# EAGLE library part CON_BEAGLEBONE (library dp_devices.v6)
Beagle Bone Cape
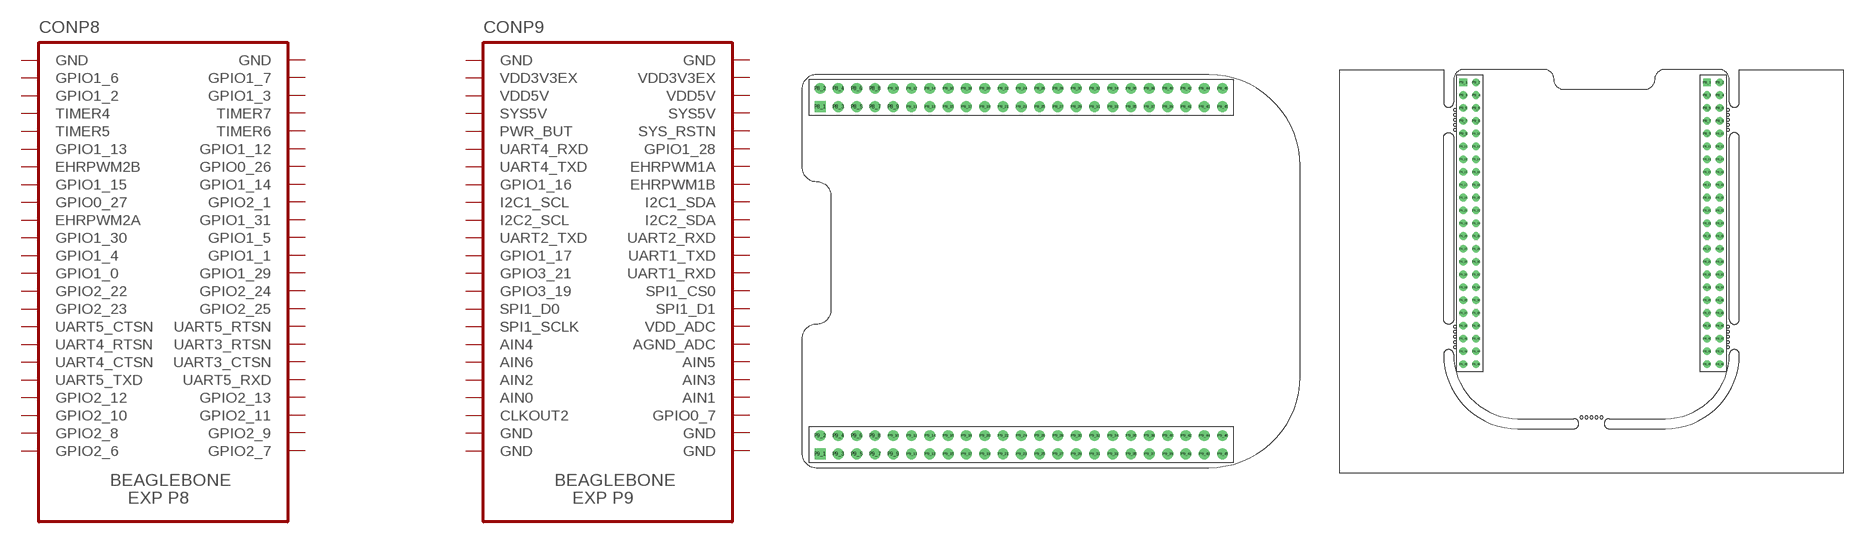
[diagram p147: symbol with the pads of CON_BEAGLEBONE; footprints CON_BEAGLEBONE, CON_BEAGLEBONE_NB]

Designator prefix CON; gates P8=BEAGLEBONE_P8 P9=BEAGLEBONE_P9

## CON_BEAGLEBONE  [CON_BEAGLEBONE]
P8_1  P8:GND  sup
P8_2  P8:GND  sup
P8_3  P8:GPIO1_6
P8_4  P8:GPIO1_7
P8_5  P8:GPIO1_2
P8_6  P8:GPIO1_3
P8_7  P8:TIMER4
P8_8  P8:TIMER7
P8_9  P8:TIMER5
P8_10  P8:TIMER6
P8_11  P8:GPIO1_13
P8_12  P8:GPIO1_12
P8_13  P8:EHRPWM2B
P8_14  P8:GPIO0_26
P8_15  P8:GPIO1_15
P8_16  P8:GPIO1_14
P8_17  P8:GPIO0_27
P8_18  P8:GPIO2_1
P8_19  P8:EHRPWM2A
P8_20  P8:GPIO1_31
P8_21  P8:GPIO1_30
P8_22  P8:GPIO1_5
P8_23  P8:GPIO1_4
P8_24  P8:GPIO1_1
P8_25  P8:GPIO1_0
P8_26  P8:GPIO1_29
P8_27  P8:GPIO2_22
P8_28  P8:GPIO2_24
P8_29  P8:GPIO2_23
P8_30  P8:GPIO2_25
P8_31  P8:UART5_CTSN
P8_32  P8:UART5_RTSN
P8_33  P8:UART4_RTSN
P8_34  P8:UART3_RTSN
P8_35  P8:UART4_CTSN
P8_36  P8:UART3_CTSN
P8_37  P8:UART5_TXD
P8_38  P8:UART5_RXD
P8_39  P8:GPIO2_12
P8_40  P8:GPIO2_13
P8_41  P8:GPIO2_10
P8_42  P8:GPIO2_11
P8_43  P8:GPIO2_8
P8_44  P8:GPIO2_9
P8_45  P8:GPIO2_6
P8_46  P8:GPIO2_7
P9_1  P9:GND  sup
P9_2  P9:GND  sup
P9_3  P9:VDD3V3EX  sup
P9_4  P9:VDD3V3EX  sup
P9_5  P9:VDD5V  sup
P9_6  P9:VDD5V  sup
P9_7  P9:SYS5V  sup
P9_8  P9:SYS5V  sup
P9_9  P9:PWR_BUT
P9_10  P9:SYS_RSTN
P9_11  P9:UART4_RXD
P9_12  P9:GPIO1_28
P9_13  P9:UART4_TXD
P9_14  P9:EHRPWM1A
P9_15  P9:GPIO1_16
P9_16  P9:EHRPWM1B
P9_17  P9:I2C1_SCL
P9_18  P9:I2C1_SDA
P9_19  P9:I2C2_SCL
P9_20  P9:I2C2_SDA
P9_21  P9:UART2_TXD
P9_22  P9:UART2_RXD
P9_23  P9:GPIO1_17
P9_24  P9:UART1_TXD
P9_25  P9:GPIO3_21
P9_26  P9:UART1_RXD
P9_27  P9:GPIO3_19
P9_28  P9:SPI1_CS0
P9_29  P9:SPI1_D0
P9_30  P9:SPI1_D1
P9_31  P9:SPI1_SCLK
P9_32  P9:VDD_ADC
P9_33  P9:AIN4
P9_34  P9:AGND_ADC
P9_35  P9:AIN6
P9_36  P9:AIN5
P9_37  P9:AIN2
P9_38  P9:AIN3
P9_39  P9:AIN0
P9_40  P9:AIN1
P9_41  P9:CLKOUT2
P9_42  P9:GPIO0_7
P9_43  P9:GND
P9_44  P9:GND
P9_45  P9:GND
P9_46  P9:GND

## CON_BEAGLEBONE-NB  [CON_BEAGLEBONE_NB]
Pads as for CON_BEAGLEBONE

## Footprint CON_BEAGLEBONE (pad centres in mm)
Derived from Beaglebone rev c2 http://elinux.org/Beagleboard:BeagleBone#Rev_A6A
drill 1 square: P8_1 2.54,50.165; P9_1 2.54,1.905
drill 1: P8_2 2.54,52.705; P8_3 5.08,50.165; P8_4 5.08,52.705; P8_5 7.62,50.165; P8_6 7.62,52.705; P8_7 10.16,50.165; P8_8 10.16,52.705; P8_9 12.7,50.165; P8_10 12.7,52.705; P8_11 15.24,50.165; P8_12 15.24,52.705; P8_13 17.78,50.165; P8_14 17.78,52.705; P8_15 20.32,50.165; P8_16 20.32,52.705; P8_17 22.86,50.165; P8_18 22.86,52.705; P8_19 25.4,50.165; P8_20 25.4,52.705; P8_21 27.94,50.165; P8_22 27.94,52.705; P8_23 30.48,50.165; P8_24 30.48,52.705; P8_25 33.02,50.165; P8_26 33.02,52.705; P8_27 35.56,50.165; P8_28 35.56,52.705; P8_29 38.1,50.165; P8_30 38.1,52.705; P8_31 40.64,50.165; P8_32 40.64,52.705; P8_33 43.18,50.165; P8_34 43.18,52.705; P8_35 45.72,50.165; P8_36 45.72,52.705; P8_37 48.26,50.165; P8_38 48.26,52.705; P8_39 50.8,50.165; P8_40 50.8,52.705; P8_41 53.34,50.165; P8_42 53.34,52.705; P8_43 55.88,50.165; P8_44 55.88,52.705; P8_45 58.42,50.165; P8_46 58.42,52.705; P9_2 2.54,4.445; P9_3 5.08,1.905; P9_4 5.08,4.445; P9_5 7.62,1.905; P9_6 7.62,4.445; P9_7 10.16,1.905; P9_8 10.16,4.445; P9_9 12.7,1.905; P9_10 12.7,4.445; P9_11 15.24,1.905; P9_12 15.24,4.445; P9_13 17.78,1.905; P9_14 17.78,4.445; P9_15 20.32,1.905; P9_16 20.32,4.445; P9_17 22.86,1.905; P9_18 22.86,4.445; P9_19 25.4,1.905; P9_20 25.4,4.445; P9_21 27.94,1.905; P9_22 27.94,4.445; P9_23 30.48,1.905; P9_24 30.48,4.445; P9_25 33.02,1.905; P9_26 33.02,4.445; P9_27 35.56,1.905; P9_28 35.56,4.445; P9_29 38.1,1.905; P9_30 38.1,4.445; P9_31 40.64,1.905; P9_32 40.64,4.445; P9_33 43.18,1.905; P9_34 43.18,4.445; P9_35 45.72,1.905; P9_36 45.72,4.445; P9_37 48.26,1.905; P9_38 48.26,4.445; P9_39 50.8,1.905; P9_40 50.8,4.445; P9_41 53.34,1.905; P9_42 53.34,4.445; P9_43 55.88,1.905; P9_44 55.88,4.445; P9_45 58.42,1.905; P9_46 58.42,4.445

## Footprint CON_BEAGLEBONE_NB (pad centres in mm)
Derived from Beaglebone rev c2 http://elinux.org/Beagleboard:BeagleBone#Rev_A6A Break-offs with eagle limitation 100x80 mm
drill 1 square: P8_1 72.86,77.46; P9_1 24.6,77.46
drill 1: P8_2 75.4,77.46; P8_3 72.86,74.92; P8_4 75.4,74.92; P8_5 72.86,72.38; P8_6 75.4,72.38; P8_7 72.86,69.84; P8_8 75.4,69.84; P8_9 72.86,67.3; P8_10 75.4,67.3; P8_11 72.86,64.76; P8_12 75.4,64.76; P8_13 72.86,62.22; P8_14 75.4,62.22; P8_15 72.86,59.68; P8_16 75.4,59.68; P8_17 72.86,57.14; P8_18 75.4,57.14; P8_19 72.86,54.6; P8_20 75.4,54.6; P8_21 72.86,52.06; P8_22 75.4,52.06; P8_23 72.86,49.52; P8_24 75.4,49.52; P8_25 72.86,46.98; P8_26 75.4,46.98; P8_27 72.86,44.44; P8_28 75.4,44.44; P8_29 72.86,41.9; P8_30 75.4,41.9; P8_31 72.86,39.36; P8_32 75.4,39.36; P8_33 72.86,36.82; P8_34 75.4,36.82; P8_35 72.86,34.28; P8_36 75.4,34.28; P8_37 72.86,31.74; P8_38 75.4,31.74; P8_39 72.86,29.2; P8_40 75.4,29.2; P8_41 72.86,26.66; P8_42 75.4,26.66; P8_43 72.86,24.12; P8_44 75.4,24.12; P8_45 72.86,21.58; P8_46 75.4,21.58; P9_2 27.14,77.46; P9_3 24.6,74.92; P9_4 27.14,74.92; P9_5 24.6,72.38; P9_6 27.14,72.38; P9_7 24.6,69.84; P9_8 27.14,69.84; P9_9 24.6,67.3; P9_10 27.14,67.3; P9_11 24.6,64.76; P9_12 27.14,64.76; P9_13 24.6,62.22; P9_14 27.14,62.22; P9_15 24.6,59.68; P9_16 27.14,59.68; P9_17 24.6,57.14; P9_18 27.14,57.14; P9_19 24.6,54.6; P9_20 27.14,54.6; P9_21 24.6,52.06; P9_22 27.14,52.06; P9_23 24.6,49.52; P9_24 27.14,49.52; P9_25 24.6,46.98; P9_26 27.14,46.98; P9_27 24.6,44.44; P9_28 27.14,44.44; P9_29 24.6,41.9; P9_30 27.14,41.9; P9_31 24.6,39.36; P9_32 27.14,39.36; P9_33 24.6,36.82; P9_34 27.14,36.82; P9_35 24.6,34.28; P9_36 27.14,34.28; P9_37 24.6,31.74; P9_38 27.14,31.74; P9_39 24.6,29.2; P9_40 27.14,29.2; P9_41 24.6,26.66; P9_42 27.14,26.66; P9_43 24.6,24.12; P9_44 27.14,24.12; P9_45 24.6,21.58; P9_46 27.14,21.58
hole 0.5 at 77.055,72
hole 0.5 at 77.055,71
hole 0.5 at 77.055,70
hole 0.5 at 77.055,69
hole 0.5 at 77.055,68
hole 0.5 at 77.055,28.985
hole 0.5 at 77.055,27.985
hole 0.5 at 77.055,26.985
hole 0.5 at 77.055,25.985
hole 0.5 at 77.055,24.985
hole 0.5 at 52,11.035
hole 0.5 at 51,11.035
hole 0.5 at 50,11.035
hole 0.5 at 49,11.035
hole 0.5 at 48,11.035
hole 0.5 at 22.945,24.985
hole 0.5 at 22.945,25.985
hole 0.5 at 22.945,26.985
hole 0.5 at 22.945,27.985
hole 0.5 at 22.945,28.985
hole 0.5 at 22.945,72
hole 0.5 at 22.945,71
hole 0.5 at 22.945,70
hole 0.5 at 22.945,69
hole 0.5 at 22.945,68